# Altium integrated library UVR2G4R7MPD1TD.IntLib: 1 symbol
Pins are listed as number, name and electrical type; pins without a type are passive.

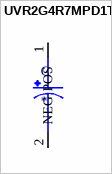
[diagram p0: symbol UVR2G4R7MPD1TD]

## UVR2G4R7MPD1TD
designator C
4.7ÂµF 400V Aluminum Electrolytic Capacitors Radial, Can 2000 Hrs @ 85Â°C; MF: Nichicon; MP: UVR2G4R7MPD1TD; Availability: Unavailable; Price: None; SnapEDA_Link: https://www.snapeda.com/parts/UVR2G4R7MPD1TD/Nichicon/view-part/550792/?ref=snap; Package: Radial Nichicon; Value: *
footprint CAPPRD500W60D1000H750B
pins: 1 POS, 2 NEG